# Altium footprint library custom-case.PcbLib: 483 footprints (part 25 of 31)
Each footprint in its own frame and in the unit in brackets; x right, y up, seen from the top. Pads: shape width x height; smd on the part's side, far side on the other; paste and mask are expansions set on the pad; w line width, h text height; cw(c..) or ccw(c..) is an arc to the next point about the centre after c.
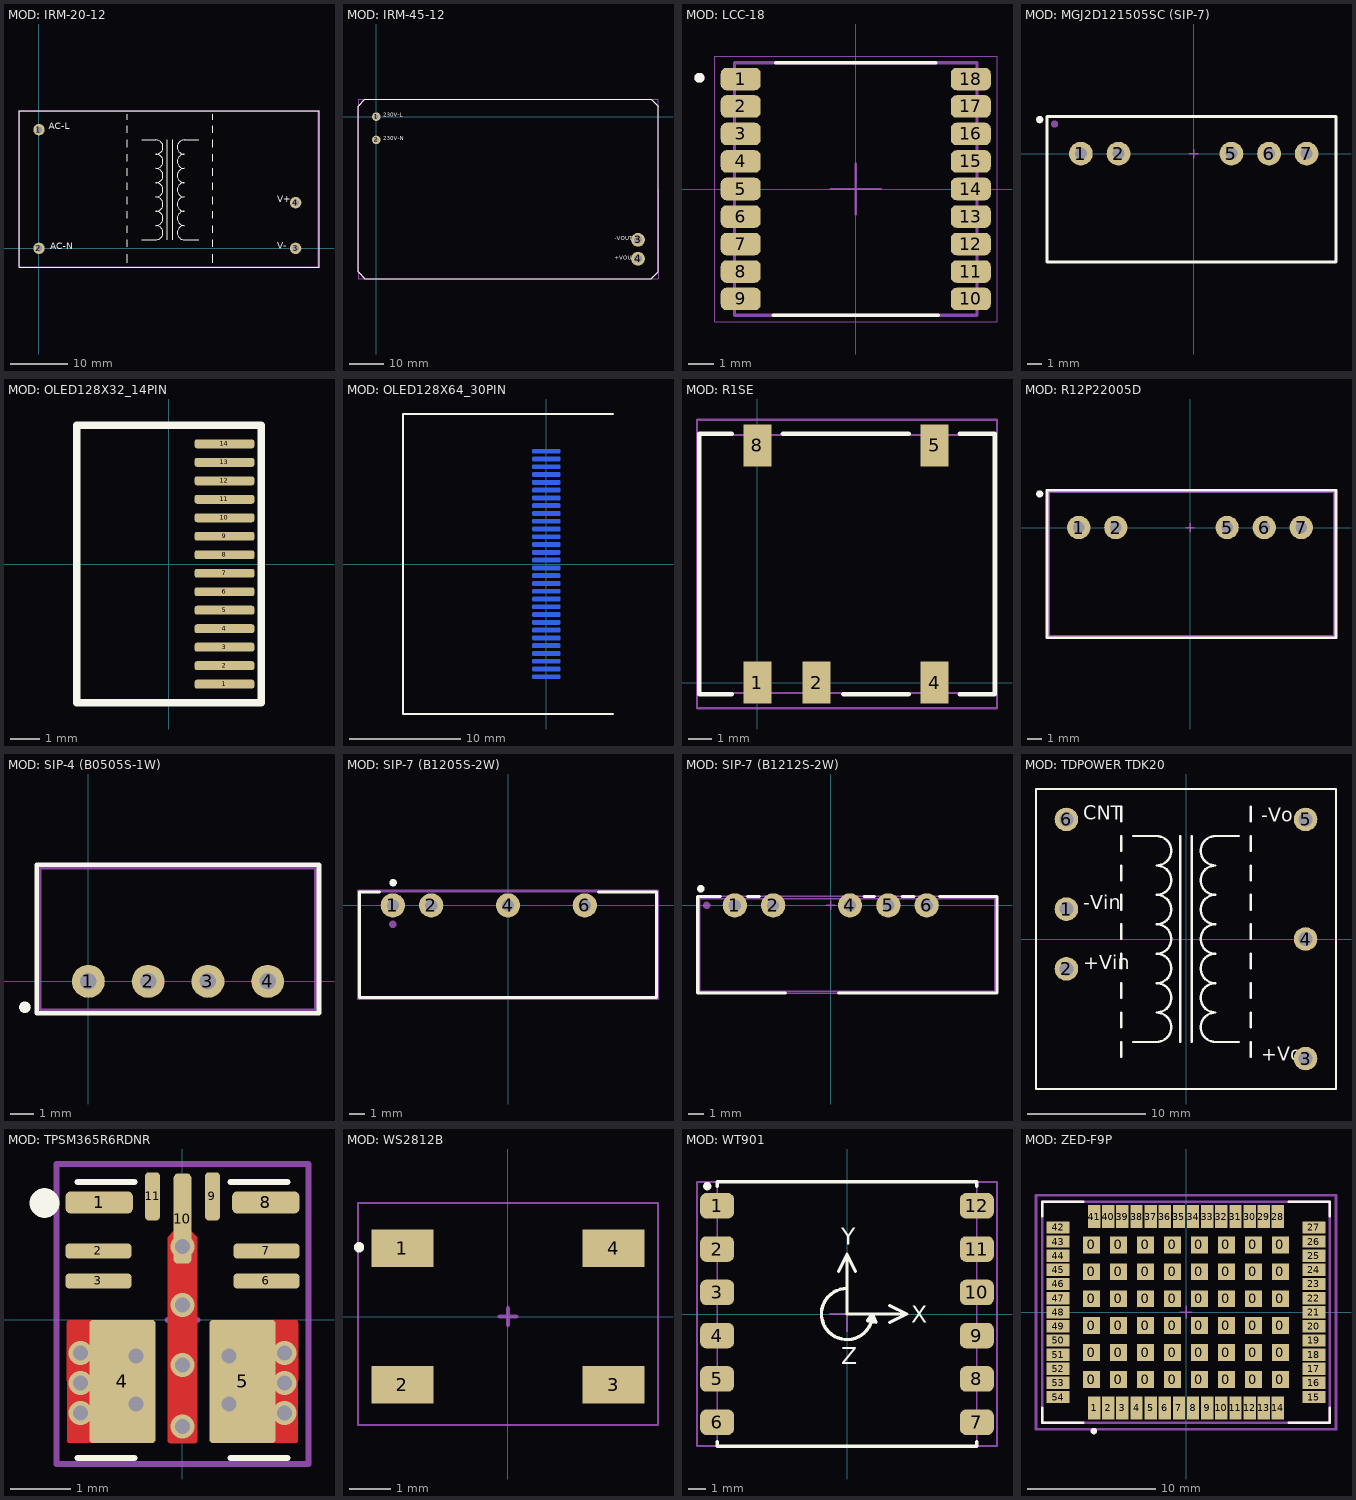
[diagram p24: the footprints below, top view; thin cyan lines are the x and y axes]

## MOD: IRM-20-12 [mm]
pads (4):
  round 2 hole 1.1: 1(0,20.8) 2(0,0) 3(45,0) 4(45,8)
Top Overlay:
  lines w0.2: 15.5,-2.5 15.5,-1 ; 15.5,0.25 15.5,1.5 ; 15.5,2.75 15.5,4 ; 15.5,5.25 15.5,6.5 ; 15.5,7.75 15.5,9 ; 15.5,10.25 15.5,11.5 ; 15.5,12.75 15.5,14 ; 15.5,15.25 15.5,16.5 ; 15.5,17.75 15.5,19 ; 15.5,20.25 15.5,21.5 ; 15.5,22.5 15.5,23.5 ; 18,1.5 20.5,1.5 ccw(c20.5,2.75) 20.5,4 ccw(c20.5,5.25) 20.5,6.5 ccw(c20.5,7.75) 20.5,9 ccw(c20.5,10.25) 20.5,11.5 ccw(c20.5,12.75) 20.5,14 ccw(c20.5,15.25) 20.5,16.5 ccw(c20.5,17.75) 20.5,19 18,19 ; 22.5,1.5 22.5,19 ; 23.5,1.5 23.5,19 ; 28,1.5 25.5,1.5 cw(c25.5,2.75) 25.5,4 cw(c25.5,5.25) 25.5,6.5 cw(c25.5,7.75) 25.5,9 cw(c25.5,10.25) 25.5,11.5 cw(c25.5,12.75) 25.5,14 cw(c25.5,15.25) 25.5,16.5 cw(c25.5,17.75) 25.5,19 28,19 ; 30.5,-2.5 30.5,-1 ; 30.5,0.25 30.5,1.5 ; 30.5,2.75 30.5,4 ; 30.5,5.25 30.5,6.5 ; 30.5,7.75 30.5,9 ; 30.5,10.25 30.5,11.5 ; 30.5,12.75 30.5,14 ; 30.5,15.25 30.5,16.5 ; 30.5,17.75 30.5,19 ; 30.5,20.25 30.5,21.5 ; 30.5,22.5 30.5,23.5 ; -3.5,-3.3 49.1,-3.3 49.1,24.1 -3.5,24.1 -3.5,-3.3
  text "V+" at 41.8,7.6 h2
  text "V-" at 41.8,-0.5 h2
  text "AC-N" at 2,-0.6 h2
  text "AC-L" at 1.7,20.4 h2
Top Assy:
  lines w0.1: -3.4,-3.2 49,-3.2 49,24 -3.4,24 -3.4,-3.2
  text "V+" at 41.8,7.6 h2
  text "V-" at 41.8,-0.5 h2
  text "AC-N" at 2,-0.6 h2
  text "AC-L" at 1.7,20.4 h2
Size Area:
  lines w0.1: -3.5,-3.3 -3.5,24.1 49.1,24.1 49.1,-3.3 -3.5,-3.3
3D body "IRM-20-12.STEP": height 24, standoff -3, extent -3.4,-3.2 49,24

## MOD: IRM-45-12 [mm]
pads (4):
  round 2.5 hole 1.2: 1(0,0) 2(0,-6.75)
  round 4 hole 2.2: 3(76,-35.75) 4(76,-41.25)
Top Overlay:
  lines w0.2: -5.3,3 -5.3,-45.05 -3.3,-47.05 79.8,-47.05 81.8,-45.05 81.8,3 79.8,5 -3.3,5 -5.3,3 ; -5.3,3 -5.3,3
  text "-VOUT" at 69.25,-36.25 h2
  text "+VOUT" at 69.25,-42 h2
  text "230V-L" at 2,-0.5 h2
  text "230V-N" at 2,-7.25 h2
Top Assy:
  lines w0.1: -5.3,-45.05 -3.25,-47.1 79.75,-47.1 81.8,-45.05 81.8,3 79.8,5 -3.3,5 -5.3,3 -5.3,-45.05
  text "-VOUT" at 69.25,-36.25 h2
  text "+VOUT" at 69.25,-42 h2
  text "230V-N" at 2,-7.25 h2
  text "230V-L" at 2,-0.5 h2
Size Area:
  lines w0.1: -5.3,-47.1 -5.3,5.1 81.8,5.1 81.8,-47.1 -5.3,-47.1
3D body "IRM-45-15.step": height 29.51, standoff -3.5, extent -5.25,-47 81.75,5

## MOD: LCC-18 [mm]
pads (18):
  rrect50% 1.6x0.9 smd: 1(-4.6,4.4) 2(-4.6,3.3) 3(-4.6,2.2) 4(-4.6,1.1) 5(-4.6,0) 6(-4.6,-1.1) 7(-4.6,-2.2) 8(-4.6,-3.3) 9(-4.6,-4.4) 10(4.6,-4.4) 11(4.6,-3.3) 12(4.6,-2.2) 13(4.6,-1.1) 14(4.6,0) 15(4.6,1.1) 16(4.6,2.2) 17(4.6,3.3) 18(4.6,4.4)
Top Overlay:
  circle w0.2: c-6.25,4.45 r0.1
  lines w0.127: -3.3,-5.05 3.3,-5.05 ; -3.2,5.05 3.2,5.05
3D model:
  circle w0.2: c-6.25,4.45 r0.1
  lines w0.127: -4.85,-5.05 4.85,-5.05 4.85,5.05 -4.85,5.05 -4.85,-5.05
Size Area:
  lines w0.05: -5.65,-5.3 -5.65,5.3 5.65,5.3 5.65,-5.3 -5.65,-5.3
  lines w0.1: -1,0 1,0 ; 0,-1 0,1
3D body "step_temp.STEP": height 2.3, standoff 0, extent -4.85,-5.05 4.85,5.05

## MOD: MGJ2D121505SC (SIP-7) [mm]
pads (7):
  round 1.6 hole 0.8: 1(-7.62,0) 2(-5.08,0) 5(2.54,0) 6(5.08,0) 7(7.62,0)
  round 0.5 on Top Overlay: ""(-10.4,2.3)
  round 0.5 on Mech1: ""(-9.4,2)
Top Overlay:
  lines w0.2: -9.9,-7.32 -9.9,2.5 9.6,2.5 9.6,-7.32 -9.9,-7.32
Top Assy:
  lines w0.1: -9.9,-7.32 -9.9,2.5 9.6,2.5 9.6,-7.32 -9.9,-7.32
Size Area:
  lines w0.1: -0.3,0 0.3,0 ; 0,-0.3 0,0.3 ; -9.9,-7.32 -9.9,2.5 9.6,2.5 9.6,-7.32 -9.9,-7.32
3D body "mps_dcdc_mgj2d_sc_a.step": height 12.6, standoff -4, extent -9.9,-7.32 9.6,2.5

## MOD: OLED128X32_14PIN [mm] "OLED Display 128x32"
height 1.2
pads (14):
  rrect50% 2x0.3 smd: 1(1.87,-4.03) 2(1.87,-3.41) 3(1.87,-2.79) 4(1.87,-2.17) 5(1.87,-1.55) 6(1.87,-0.93) 7(1.87,-0.31) 8(1.87,0.31) 9(1.87,0.93) 10(1.87,1.55) 11(1.87,2.17) 12(1.87,2.79) 13(1.87,3.41) 14(1.87,4.03)
Top Overlay:
  lines w0.254: -3.09,-4.65 3.11,-4.65 3.11,4.65 -3.09,4.65 -3.09,-4.65

## MOD: OLED128X64_30PIN [mm] "OLED Display 128x64"
height 1.2
pads (30):
  rrect50% 2.5x0.4 smd far side: 1(0,-10.15) 2(0,-9.45) 3(0,-8.75) 4(0,-8.05) 5(0,-7.35) 6(0,-6.65) 7(0,-5.95) 8(0,-5.25) 9(0,-4.55) 10(0,-3.85) 11(0,-3.15) 12(0,-2.45) 13(0,-1.75) 14(0,-1.05) 15(0,-0.35) 16(0,0.35) 17(0,1.05) 18(0,1.75) 19(0,2.45) 20(0,3.15) 21(0,3.85) 22(0,4.55) 23(0,5.25) 24(0,5.95) 25(0,6.65) 26(0,7.35) 27(0,8.05) 28(0,8.75) 29(0,9.45) 30(0,10.15)
Top Overlay:
  lines w0.2: 6,-13.5 -12.9,-13.5 -12.9,13.5 6,13.5
Bottom Overlay:
  text "1" at 0.746,-11.496 h1.52
3D body "OLED_096_1.6mmPCB.STEP": height 1.45, standoff -1.66, extent -12.76,-13.35 8,13.35

## MOD: R1SE [mm]
pads (5):
  rect 1.2x1.8 smd: 1(0,0) 2(2.54,0) 4(7.62,0) 5(7.62,10.2) 8(0,10.2)
Top Overlay:
  lines w0.2: -1.1,-0.5 -2.5,-0.5 -2.5,10.7 -1.1,10.7 ; 1.1,10.7 6.5,10.7 ; 3.7,-0.5 6.5,-0.5 ; 8.7,-0.5 10.2,-0.5 10.2,10.7 8.7,10.7
Top Assy:
  lines w0.1: -2.525,-0.45 -2.525,10.65 10.225,10.65 10.225,-0.45 -2.525,-0.45
Size Area:
  lines w0.1: -2.6,-1.1 10.3,-1.1 10.3,11.3 -2.6,11.3 -2.6,-1.1
3D body "User Library-RECOM_R1S-xxxx.STEP": height 7, standoff 0, extent -2.525,-0.45 10.225,10.65

## MOD: R12P22005D [mm]
pads (6):
  round 1.6 hole 0.8: 1(-7.62,0) 2(-5.08,0) 5(2.54,0) 6(5.08,0) 7(7.62,0)
  round 0.5 on Top Overlay: ""(-10.3,2.3)
Top Overlay:
  lines w0.2: -9.8,-7.55 -9.8,2.55 10,2.55 10,-7.55 -9.8,-7.55
Top Assy:
  lines w0.1: -9.65,-7.4 -9.65,2.4 9.85,2.4 9.85,-7.4 -9.65,-7.4
Size Area:
  lines w0.1: -0.3,0 0.3,0 ; 0,-0.3 0,0.3 ; -9.75,-7.5 -9.75,2.5 9.95,2.5 9.95,-7.5 -9.75,-7.5
3D body "SIP-7 (19.5x9.8x12.5).STEP": height 12.51, standoff -4.09, extent -9.65,-7.4 9.85,2.4

## MOD: SIP-4 (B0505S-1W) [mm]
pads (5):
  round 1.4 hole 0.7: 1(0,0) 2(2.54,0) 3(5.08,0) 4(7.62,0)
  round 0.5 on Top Overlay: ""(-2.7,-1.1)
Top Overlay:
  lines w0.2: -2.2,-1.35 9.8,-1.35 9.8,4.95 -2.2,4.95 -2.2,-1.35
Top Assy:
  lines w0.1: -2.042,-1.2 9.642,-1.2 9.642,4.8 -2.042,4.8 -2.042,-1.2
Size Area:
  lines w0.1: -2.15,-1.3 9.75,-1.3 9.75,4.9 -2.15,4.9 -2.15,-1.3
3D body "User Library-4-Lead SIP_AM1S-1205SZ_Aimtec_DC-DC_Converter_1_Watt.STEP": height 10.2, standoff -3, extent -2.042,-1.2 9.642,4.8

## MOD: SIP-7 (B1205S-2W) [mm]
pads (6):
  round 1.6 hole 0.8: 1(-7.62,0) 2(-5.08,0) 4(0,0) 6(5.08,0)
  round 0.5 on Mech1: ""(-7.625,-1.25)
  round 0.5 on Top Overlay: ""(-7.6,1.5)
Top Overlay:
  lines w0.2: -8.5,0.9 -9.825,0.9 -9.825,-6.1 9.825,-6.1 9.825,0.9 6,0.9
Top Assy:
  lines w0.1: -9.825,-6.1 9.825,-6.1 9.825,0.9 -9.825,0.9 -9.825,-6.1
Size Area:
  lines w0.1: -0.3,0 0.3,0 ; 0,-0.3 0,0.3 ; -9.925,-6.2 -9.925,1 9.925,1 9.925,-6.2 -9.925,-6.2
3D body "PDME1-S24-D15-S--3DModel-STEP-387902.STEP": height 10.16, standoff -4.1, extent -9.825,-5.1 9.825,0.9

## MOD: SIP-7 (B1212S-2W) [mm]
pads (7):
  round 1.6 hole 0.8: 1(-6.35,0) 2(-3.81,0) 4(1.27,0) 5(3.81,0) 6(6.35,0)
  round 0.5 on Top Overlay: ""(-8.6,1.1)
  round 0.5 on Mech1: ""(-8.21,0)
Top Overlay:
  lines w0.2: -7.3,0.6 -8.8,0.6 -8.8,-5.8 -3,-5.8 ; -5.5,0.6 -4.7,0.6 ; 0.5,-5.8 11,-5.8 11,0.6 7.2,0.6 ; 2.2,0.6 2.9,0.6 ; 4.7,0.6 5.5,0.6
Top Assy:
  lines w0.1: -8.66,-5.67 -8.66,0.45 10.84,0.45 10.84,-5.67 -8.66,-5.67
Size Area:
  lines w0.1: -0.3,0 0.3,0 ; 0,-0.3 0,0.3 ; -8.8,-5.8 11,-5.8 11,0.6 -8.8,0.6 -8.8,-5.8
3D body "User Library-Traco TMA 0505S.STEP": height 10.2, standoff -3.2, extent -8.66,-5.67 10.84,0.45

## MOD: TDPOWER TDK20 [mm] "20W DC-DC"
pads (6):
  round 2 hole 1.2: 1(-10.16,2.54) 2(-10.16,-2.54) 3(10.16,-10.16) 4(10.16,0) 5(10.16,10.16) 6(-10.16,10.16)
Top Overlay:
  lines w0.2: -5.5,-10 -5.5,-8.75 ; -5.5,-7.5 -5.5,-6.25 ; -5.5,-5 -5.5,-3.75 ; -5.5,-2.5 -5.5,-1.25 ; -5.5,0 -5.5,1.25 ; -5.5,2.5 -5.5,3.75 ; -5.5,5 -5.5,6.25 ; -5.5,7.5 -5.5,8.75 ; -5.5,10 -5.5,11.25 ; -4.5,-8.75 -2.5,-8.75 ccw(c-2.5,-7.5) -2.5,-6.25 ccw(c-2.5,-5) -2.5,-3.75 ccw(c-2.5,-2.5) -2.5,-1.25 ccw(c-2.5,0) -2.5,1.25 ccw(c-2.5,2.5) -2.5,3.75 ccw(c-2.5,5) -2.5,6.25 ccw(c-2.5,7.5) -2.5,8.75 -4.5,8.75 ; -0.5,-8.75 -0.5,8.75 ; 0.5,-8.75 0.5,8.75 ; 4.5,-8.75 2.5,-8.75 cw(c2.5,-7.5) 2.5,-6.25 cw(c2.5,-5) 2.5,-3.75 cw(c2.5,-2.5) 2.5,-1.25 cw(c2.5,0) 2.5,1.25 cw(c2.5,2.5) 2.5,3.75 cw(c2.5,5) 2.5,6.25 cw(c2.5,7.5) 2.5,8.75 4.5,8.75 ; 5.5,-10 5.5,-8.75 ; 5.5,-7.5 5.5,-6.25 ; 5.5,-5 5.5,-3.75 ; 5.5,-2.5 5.5,-1.25 ; 5.5,0 5.5,1.25 ; 5.5,2.5 5.5,3.75 ; 5.5,5 5.5,6.25 ; 5.5,7.5 5.5,8.75 ; 5.5,10 5.5,11.25 ; -12.75,-12.75 12.75,-12.75 12.75,12.75 -12.75,12.75 -12.75,-12.75
  text "CNT" at -8.75,9.75 h2
  text "-Vin" at -8.75,2.13 h2
  text "+Vin" at -8.75,-2.95 h2
  text "-Vo" at 6.413,9.59 h2
  text "+Vo" at 6.413,-10.73 h2
Top Assy:
  lines w0.1: -12.75,-12.75 12.75,-12.75 12.75,12.75 -12.75,12.75 -12.75,-12.75
Size Area:
  lines w0.1: -12.75,-12.75 -12.75,12.75 12.75,12.75 12.75,-12.75 -12.75,-12.75
3D body "TDPOWER_TDK20.STEP": height 12.81, standoff -3.99, extent -12.7,-12.7 12.7,12.7

## MOD: TPSM365R6RDNR [mm] "Buck converted module"
pads (12):
  rrect50% 1.125x0.37 smd mask+0.05: 1(-1.388,1.96) 8(1.388,1.96)
  rrect50% 1.1x0.25 smd mask+0.05: 2(-1.4,1.15) 3(-1.4,0.65) 6(1.4,0.65) 7(1.4,1.15)
  rrect10% 1.1x2.05 smd paste-2539.97 mask+0.05: 4(-1,-1.025) 5(1,-1.025)
  rrect50% 0.25x0.8 smd mask+0.05: 9(0.5,2.06) 11(-0.5,2.06)
  rrect50% 0.3x1.5 smd mask+0.05: 10(0,1.69)
  round 0.5 on Top Overlay: ""(-2.3,1.95)
via -1.7,-0.55 diameter 0.4 hole 0.25
via -1.7,-1.05 diameter 0.4 hole 0.25
via -1.7,-1.55 diameter 0.4 hole 0.25
via 1.7,-1.55 diameter 0.4 hole 0.25
via 1.7,-1.05 diameter 0.4 hole 0.25
via 1.7,-0.55 diameter 0.4 hole 0.25
via 0.775,-1.4 diameter 0.4 hole 0.25
via 0.775,-0.6 diameter 0.4 hole 0.25
via -0.775,-1.4 diameter 0.4 hole 0.25
via -0.775,-0.6 diameter 0.4 hole 0.25
via 0,-1.775 diameter 0.4 hole 0.25
via 0,-0.75 diameter 0.4 hole 0.25
via 0,0.25 diameter 0.4 hole 0.25
via 0,1.225 diameter 0.4 hole 0.25
Top Layer:
  region: 0,-2.05 0.2,-2.05 0.21,-2.05 0.228,-2.042 0.242,-2.028 0.25,-2.01 0.25,-2 0.25,1.35 0.25,1.356 0.248,1.368 0.243,1.379 0.237,1.388 0.232,1.393 0.15,1.475 0,1.475
  region: 0,-2.05 -0.2,-2.05 -0.21,-2.05 -0.228,-2.042 -0.242,-2.028 -0.25,-2.01 -0.25,-2 -0.25,1.35 -0.25,1.356 -0.248,1.368 -0.243,1.379 -0.237,1.388 -0.232,1.393 -0.15,1.475 0,1.475
  region: 1.495,0 1.875,0 1.885,0 1.903,-0.008 1.917,-0.022 1.925,-0.04 1.925,-0.05 1.925,-2 1.925,-2.01 1.917,-2.028 1.903,-2.042 1.885,-2.05 1.875,-2.05 1.495,-2.05
  region: -1.495,0 -1.875,0 -1.885,0 -1.903,-0.008 -1.917,-0.022 -1.925,-0.04 -1.925,-0.05 -1.925,-2 -1.925,-2.01 -1.917,-2.028 -1.903,-2.042 -1.885,-2.05 -1.875,-2.05 -1.495,-2.05
Top Overlay:
  lines w0.1: -1.75,-2.3 -0.8,-2.3 ; -1.75,2.3 -0.8,2.3 ; 0.8,-2.3 1.75,-2.3 ; 0.8,2.3 1.75,2.3
Top Paste:
  drawing of 14 lines, arcs and shapes, not listed
Top Solder:
  region: 1,-0.175 1.9,-0.175 1.905,-0.175 1.914,-0.179 1.921,-0.186 1.925,-0.195 1.925,-0.2 1.925,-0.4 1.925,-0.405 1.921,-0.414 1.914,-0.421 1.905,-0.425 1.9,-0.425 1,-0.425
  region: 1,-0.675 1.9,-0.675 1.905,-0.675 1.914,-0.679 1.921,-0.686 1.925,-0.695 1.925,-0.7 1.925,-0.9 1.925,-0.905 1.921,-0.914 1.914,-0.921 1.905,-0.925 1.9,-0.925 1,-0.925
  region: 1,-1.175 1.9,-1.175 1.905,-1.175 1.914,-1.179 1.921,-1.186 1.925,-1.195 1.925,-1.2 1.925,-1.4 1.925,-1.405 1.921,-1.414 1.914,-1.421 1.905,-1.425 1.9,-1.425 1,-1.425
  region: 1,-1.675 1.9,-1.675 1.905,-1.675 1.914,-1.679 1.921,-1.686 1.925,-1.695 1.925,-1.7 1.925,-1.9 1.925,-1.905 1.921,-1.914 1.914,-1.921 1.905,-1.925 1.9,-1.925 1,-1.925
  region: -1,-0.175 -1.9,-0.175 -1.905,-0.175 -1.914,-0.179 -1.921,-0.186 -1.925,-0.195 -1.925,-0.2 -1.925,-0.4 -1.925,-0.405 -1.921,-0.414 -1.914,-0.421 -1.905,-0.425 -1.9,-0.425 -1,-0.425
  region: -1,-0.675 -1.9,-0.675 -1.905,-0.675 -1.914,-0.679 -1.921,-0.686 -1.925,-0.695 -1.925,-0.7 -1.925,-0.9 -1.925,-0.905 -1.921,-0.914 -1.914,-0.921 -1.905,-0.925 -1.9,-0.925 -1,-0.925
  region: -1,-1.175 -1.9,-1.175 -1.905,-1.175 -1.914,-1.179 -1.921,-1.186 -1.925,-1.195 -1.925,-1.2 -1.925,-1.4 -1.925,-1.405 -1.921,-1.414 -1.914,-1.421 -1.905,-1.425 -1.9,-1.425 -1,-1.425
  region: -1,-1.675 -1.9,-1.675 -1.905,-1.675 -1.914,-1.679 -1.921,-1.686 -1.925,-1.695 -1.925,-1.7 -1.925,-1.9 -1.925,-1.905 -1.921,-1.914 -1.914,-1.921 -1.905,-1.925 -1.9,-1.925 -1,-1.925
Size Area:
  lines w0.1: -0.25,0 0.25,0 ; 0,-0.2 0,0.2 ; -2.1,-2.4 -2.1,2.6 2.1,2.6 2.1,-2.4 -2.1,-2.4
3D body "TPSM365R6.STEP": height 2, standoff 0, extent -1.75,-2.25 1.75,2.25

## MOD: WS2812B [mm] "Bandpass Filter"
height 12
pads (4):
  rect 1.5x0.9 smd: 1(-2.55,1.65) 2(-2.55,-1.65) 3(2.55,-1.65) 4(2.55,1.65)
Top Overlay:
  circle w0.2: c-3.6,1.675 r0.025
Size Area:
  lines w0.05: -3.625,-2.625 3.625,-2.625 3.625,2.75 -3.625,2.75 -3.625,-2.625
  lines w0.1: -0.2,0 0.2,0 ; 0,-0.2 0,0.2
3D body "WS2812B--3DModel-STEP-510211.STEP": height 1.62, standoff 0, extent -2.75,-2.475 2.65,2.525

## MOD: WT901 [mm] "IMU module"
pads (13):
  rrect50% 2x1.5 smd: 1(-7.62,6.35) 2(-7.62,3.81) 3(-7.62,1.27) 4(-7.62,-1.27) 5(-7.62,-3.81) 6(-7.62,-6.35) 7(7.62,-6.35) 8(7.62,-3.81) 9(7.62,-1.27) 10(7.62,1.27) 11(7.62,3.81) 12(7.62,6.35)
  round 0.5 on Top Overlay: ""(-8.2,7.5)
Top Overlay:
  lines w0.2: -7.62,-7.5 -7.62,-7.75 7.62,-7.75 7.62,-7.5 ; -7.62,7.5 -7.62,7.75 7.62,7.75 7.62,7.5 ; -0.5,2.5 0,3.5 ; 0,1.5 ccw(c0,0) 1.5,0 ; 0.5,2.5 0,3.5 ; 2.5,-0.5 3.5,0 ; 2.5,0.5 3.5,0 ; 0,3.5 0,0 3.5,0 ; 1.5,0 1.2,-0.4 1.7,-0.5 1.5,0
  text "X" at 3.767,-0.5 h1
  text "Y" at -0.346,4.064 h1
  text "Z" at -0.346,-2.946 h1
Top Assy:
  lines w0.1: -7.62,-7.75 7.62,-7.75 7.62,7.75 -7.62,7.75 -7.62,-7.75
Size Area:
  lines w0.1: -1,0 1,0 ; 0,-1 0,1 ; -8.8,-7.75 -8.8,7.75 8.8,7.75 8.8,-7.75 -8.8,-7.75
3D body "WT901.STEP": height 2.71, standoff -0.01, extent -7.62,-7.62 7.62,7.62

## MOD: ZED-F9P [mm]
pads (102):
  rect 1.32x1.32 smd paste+0 mask+0: 0(-7.35,-5.25) 0(-7.35,-3.15) 0(-7.35,-1.05) 0(-7.35,1.05) 0(-7.35,3.15) 0(-7.35,5.25) 0(-5.25,-5.25) 0(-5.25,-3.15) 0(-5.25,-1.05) 0(-5.25,1.05) 0(-5.25,3.15) 0(-5.25,5.25) 0(-3.15,-5.25) 0(-3.15,-3.15) 0(-3.15,-1.05) 0(-3.15,1.05) 0(-3.15,3.15) 0(-3.15,5.25) 0(-1.05,-5.25) 0(-1.05,-3.15) 0(-1.05,-1.05) 0(-1.05,1.05) 0(-1.05,3.15) 0(-1.05,5.25) 0(1.05,-5.25) 0(1.05,-3.15) 0(1.05,-1.05) 0(1.05,1.05) 0(1.05,3.15) 0(1.05,5.25) 0(3.15,-5.25) 0(3.15,-3.15) 0(3.15,-1.05) 0(3.15,1.05) 0(3.15,3.15) 0(3.15,5.25) 0(5.25,-5.25) 0(5.25,-3.15) 0(5.25,-1.05) 0(5.25,1.05) 0(5.25,3.15) 0(5.25,5.25) 0(7.35,-5.25) 0(7.35,-3.15) 0(7.35,-1.05) 0(7.35,1.05) 0(7.35,3.15) 0(7.35,5.25)
  rect 0.96x1.8 smd paste+0 mask+0: 1(-7.15,-7.45) 2(-6.05,-7.45) 3(-4.95,-7.45) 4(-3.85,-7.45) 5(-2.75,-7.45) 6(-1.65,-7.45) 7(-0.55,-7.45) 8(0.55,-7.45) 9(1.65,-7.45) 10(2.75,-7.45) 11(3.85,-7.45) 12(4.95,-7.45) 13(6.05,-7.45) 14(7.15,-7.45) 28(7.15,7.45) 29(6.05,7.45) 30(4.95,7.45) 31(3.85,7.45) 32(2.75,7.45) 33(1.65,7.45) 34(0.55,7.45) 35(-0.55,7.45) 36(-1.65,7.45) 37(-2.75,7.45) 38(-3.85,7.45) 39(-4.95,7.45) 40(-6.05,7.45) 41(-7.15,7.45)
  rect 1.8x0.96 smd paste+0 mask+0: 15(9.95,-6.6) 16(9.95,-5.5) 17(9.95,-4.4) 18(9.95,-3.3) 19(9.95,-2.2) 20(9.95,-1.1) 21(9.95,0) 22(9.95,1.1) 23(9.95,2.2) 24(9.95,3.3) 25(9.95,4.4) 26(9.95,5.5) 27(9.95,6.6) 42(-9.95,6.6) 43(-9.95,5.5) 44(-9.95,4.4) 45(-9.95,3.3) 46(-9.95,2.2) 47(-9.95,1.1) 48(-9.95,0) 49(-9.95,-1.1) 50(-9.95,-2.2) 51(-9.95,-3.3) 52(-9.95,-4.4) 53(-9.95,-5.5) 54(-9.95,-6.6)
Top Overlay:
  circle w0.25: c-7.175,-9.25 r0.125
  lines w0.2: -11.175,-7.455 -11.175,-8.6 -8.005,-8.6 ; -11.175,7.455 -11.175,8.6 -8.005,8.6 ; 8.005,-8.6 11.175,-8.6 11.175,-7.455 ; 8.005,8.6 11.175,8.6 11.175,7.455
Mechanical 10:
  lines w0.2: -11.675,-9.1 -11.675,9.1 11.675,9.1 11.675,-9.1 -11.675,-9.1
  text ".Designator" at 0,0 h1
Mechanical 12:
  lines w0.2: -11.175,-8.6 -11.175,8.6 11.175,8.6 11.175,-8.6 -11.175,-8.6
Size Area:
  lines w0.1: -0.5,0 0.5,0 ; 0,-0.5 0,0.5
  lines w0.2: -11.675,-9.1 -11.675,9.1 11.675,9.1 11.675,-9.1 -11.675,-9.1
3D body "UNK_U-Blox_America_Inc._ZED-F9P-00B-02_eec.STEP": height 0.25, standoff 0, extent -11.675,-9.1 11.675,9.1